# Altium footprint library KM_ALTIUM.PcbLib: 265 footprints (part 7 of 17)
Each footprint in its own frame and in the unit in brackets; x right, y up, seen from the top. Pads: shape width x height; smd on the part's side, far side on the other; paste and mask are expansions set on the pad; w line width, h text height; cw(c..) or ccw(c..) is an arc to the next point about the centre after c.
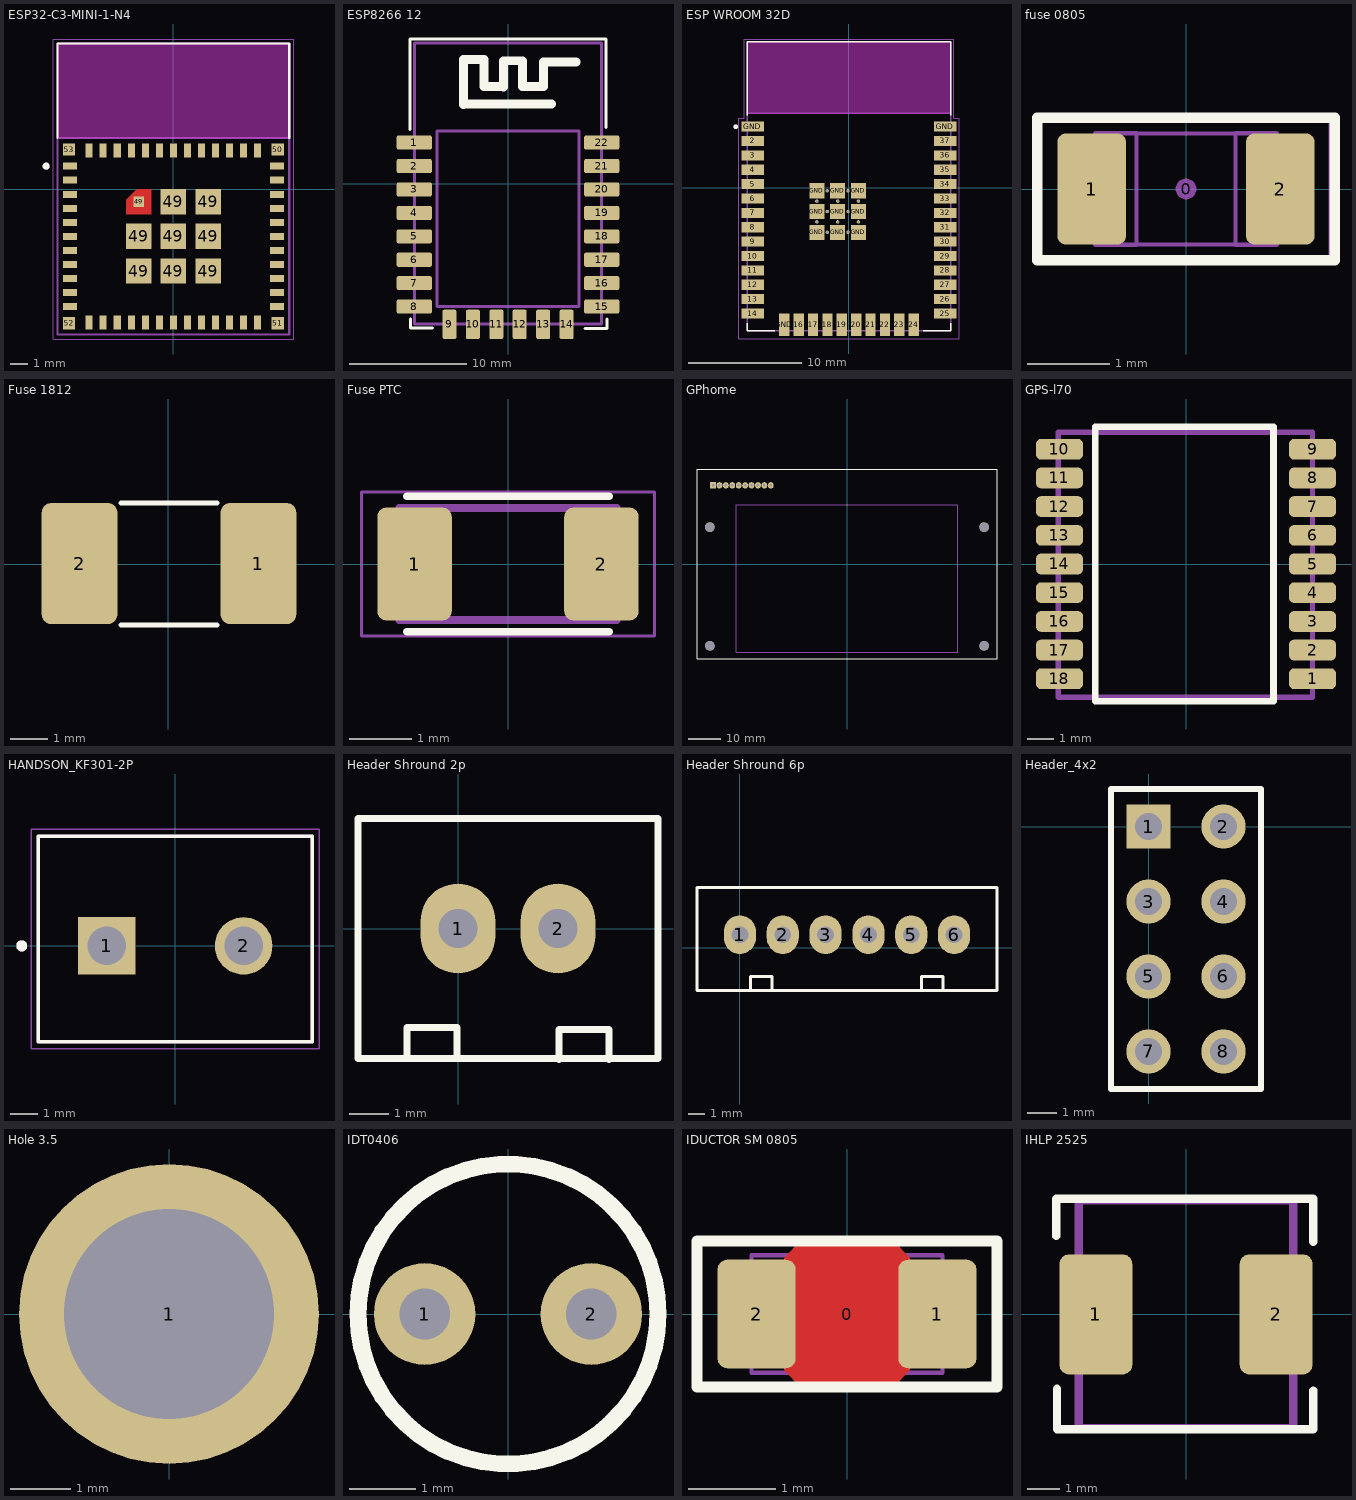
[diagram p6: the footprints below, top view; thin cyan lines are the x and y axes]

## ESP32-C3-MINI-1-N4 [mm]
height 2.55
pads (61):
  rect 0.8x0.4 smd: 1(-5.9,1.3) 2(-5.9,0.5) 3(-5.9,-0.3) 4(-5.9,-1.1) 5(-5.9,-1.9) 6(-5.9,-2.7) 7(-5.9,-3.5) 8(-5.9,-4.3) 9(-5.9,-5.1) 10(-5.9,-5.9) 11(-5.9,-6.7) 25(5.9,-6.7) 26(5.9,-5.9) 27(5.9,-5.1) 28(5.9,-4.3) 29(5.9,-3.5) 30(5.9,-2.7) 31(5.9,-1.9) 32(5.9,-1.1) 33(5.9,-0.3) 34(5.9,0.5) 35(5.9,1.3)
  rect 0.4x0.8 smd: 12(-4.8,-7.6) 13(-4,-7.6) 14(-3.2,-7.6) 15(-2.4,-7.6) 16(-1.6,-7.6) 17(-0.8,-7.6) 18(0,-7.6) 19(0.8,-7.6) 20(1.6,-7.6) 21(2.4,-7.6) 22(3.2,-7.6) 23(4,-7.6) 24(4.8,-7.6) 36(4.8,2.2) 37(4,2.2) 38(3.2,2.2) 39(2.4,2.2) 40(1.6,2.2) 41(0.8,2.2) 42(0,2.2) 43(-0.8,2.2) 44(-1.6,2.2) 45(-2.4,2.2) 46(-3.2,2.2) 47(-4,2.2) 48(-4.8,2.2)
  rect 1.45x1.45 smd: 49(-1.975,-4.675) 49(-1.975,-2.7) 49(0,-4.675) 49(0,-2.7) 49(0,-0.725) 49(1.975,-4.675) 49(1.975,-2.7) 49(1.975,-0.725)
  rect 0.6x0.6 smd paste-1 mask+0: 49(-1.975,-0.725)
  rect 0.7x0.7 smd: 50(5.95,2.25) 51(5.95,-7.65) 52(-5.95,-7.65) 53(-5.95,2.25)
Top Layer:
  region: -1.25,-1.45 -2.7,-1.45 -2.7,-0.6 -2.1,0 -1.25,0
Top Overlay:
  circle w0.2: c-7.25,1.3 r0.1
  lines w0.127: -6.6,2.92 -6.6,8.3 6.6,8.3 6.6,2.92
Top Paste:
  region: -1.25,-1.45 -2.7,-1.45 -2.7,-0.6 -2.1,0 -1.25,0
Top Solder:
  region: -1.15,-1.55 -2.8,-1.55 -2.8,-0.56 -2.14,0.1 -1.15,0.1
Keep-Out Layer:
  region: 6.6,2.9 -6.6,2.9 -6.6,8.3 6.6,8.3
  region: 6.6,2.9 -6.6,2.9 -6.6,8.3 6.6,8.3
Mechanical 13:
  circle w0.2: c-7.25,1.3 r0.1
  lines w0.127: -6.6,2.9 -6.6,-8.3 6.6,-8.3 6.6,2.9 ; -6.6,2.9 -6.6,8.3 6.6,8.3 6.6,2.9 ; -6.6,2.9 6.6,2.9
Mechanical 15:
  lines w0.05: -6.85,-8.55 -6.85,8.55 6.85,8.55 6.85,-8.55 -6.85,-8.55
3D body "ESP32-C3-MINI-1-N4--3DModel-STEP-418109 (1).STEP": height 2.55, standoff 0, extent -6.6,-8.3 6.6,8.3

## ESP8266 12 [mm]
pads (22):
  rrect25% 3x1.2 smd: 1(-8.001,3.5) 2(-8.001,1.5) 3(-8.001,-0.5) 4(-8.001,-2.5) 5(-8.001,-4.5) 6(-8.001,-6.5) 7(-8.001,-8.5) 8(-8.001,-10.5) 15(8,-10.5) 16(8,-8.5) 17(8,-6.5) 18(8,-4.5) 19(8,-2.5) 20(8,-0.5) 21(8,1.5) 22(8,3.5)
  rrect25% 1.2x2.5 smd: 9(-5,-12.014) 10(-3,-12.014) 11(-1,-12.014) 12(1,-12.014) 13(3,-12.014) 14(5,-12.014)
Top Overlay:
  lines w0.254: -8.382,4.623 -8.382,12.344 8.357,12.344 8.357,4.775 ; -8.306,-11.557 -8.306,-12.319 -6.426,-12.319 ; 6.553,-12.37 8.433,-12.37 8.433,-11.557
  lines w0.762: 3.734,6.782 -3.734,6.782 -3.785,6.731 -3.785,10.566 -3.81,10.592 -2.057,10.592 -2.057,8.28 -0.406,8.28 -0.381,8.255 -0.381,10.49 1.245,10.49 1.245,8.28 3.023,8.28 3.023,10.389 5.817,10.389
Mechanical 3:
  lines w0.254: -8,-12 -8,12 8,12 8,-12 -8,-12
Mechanical 13:
  lines w0.254: 6.02,-10.5 -6.071,-10.5 -6.071,4.496 6.045,4.496 6.045,-10.5
3D body "User Library-EPS8266 ESP-12E.STEP": height 2.65, standoff -0.04, extent -8.005,-11.98 8.005,12.025

## ESP WROOM 32D [mm]
pads (59):
  rect 2x0.9 smd: 2(-8.5,4.117) 3(-8.5,2.847) 4(-8.5,1.577) 5(-8.5,0.307) 6(-8.5,-0.963) 7(-8.5,-2.233) 8(-8.5,-3.503) 9(-8.5,-4.773) 10(-8.5,-6.043) 11(-8.5,-7.313) 12(-8.5,-8.583) 13(-8.5,-9.853) 14(-8.5,-11.123) 25(8.5,-11.123) 26(8.5,-9.853) 27(8.5,-8.583) 28(8.5,-7.313) 29(8.5,-6.043) 30(8.5,-4.773) 31(8.5,-3.503) 32(8.5,-2.233) 33(8.5,-0.963) 34(8.5,0.307) 35(8.5,1.577) 36(8.5,2.847) 37(8.5,4.117) GND(-8.5,5.387) GND(8.5,5.387)
  rect 0.9x2 smd: 16(-4.445,-12.123) 17(-3.175,-12.123) 18(-1.905,-12.123) 19(-0.635,-12.123) 20(0.635,-12.123) 21(1.905,-12.123) 22(3.175,-12.123) 23(4.445,-12.123) 24(5.715,-12.123) GND(-5.715,-12.123)
  rect 1.33x1.33 smd: GND(-2.835,-3.948) GND(-2.835,-2.113) GND(-2.835,-0.278) GND(-1,-3.948) GND(-1,-2.113) GND(-1,-0.278) GND(0.835,-3.948) GND(0.835,-2.113) GND(0.835,-0.278)
  round 0.3 hole 0.2: GND(-2.835,-3.03) GND(-2.835,-1.195) GND(-1.917,-3.948) GND(-1.917,-2.113) GND(-1.917,-0.278) GND(-1,-3.03) GND(-1,-1.195) GND(-0.082,-3.948) GND(-0.082,-2.113) GND(-0.082,-0.278) GND(0.835,-3.03) GND(0.835,-1.195)
Top Overlay:
  circle w0.2: c-10,5.377 r0.1
  lines w0.127: -9,-11.973 -9,-12.623 -6.55,-12.623 ; -9,6.377 -9,12.877 9,12.877 9,6.377 ; 6.55,-12.623 9,-12.623 9,-11.973
Keep-Out Layer:
  region: 9,6.577 -9,6.577 -9,12.877 9,12.877
Mechanical 13:
  circle w0.2: c-10,5.377 r0.1
  lines w0.127: -9,6.577 -9,-12.623 9,-12.623 9,6.577 ; -9,6.577 -9,12.877 9,12.877 9,6.577 ; -9,6.577 9,6.577
Mechanical 15:
  lines w0.05: -9.75,-13.373 9.75,-13.373 9.75,6.127 9.25,6.127 9.25,13.127 -9.25,13.127 -9.25,6.127 -9.75,6.127 -9.75,-13.373
3D body "step_temp.STEP": height 3.25, standoff 0, extent -9,-12.623 9,12.877

## fuse 0805 [mm]
pads (3):
  round 0.254 on Mech15: 0(0,0)
  rrect25% 0.83x1.35 smd: 1(-1.143,0) 2(1.143,0)
Top Overlay:
  lines w0.127: -1.803,-0.864 1.803,-0.864 1.803,0.864 -1.803,0.864 -1.803,-0.864
Mechanical 13:
  lines w0.05: 0.6,-0.674 -0.6,-0.674 ; -0.6,-0.674 0.6,-0.674 ; -0.6,-0.675 -1.1,-0.675 -1.1,0.675 -0.6,0.675 -0.6,-0.675 ; 0.6,-0.675 1.1,-0.675 1.1,0.675 0.6,0.675 ; 0.6,-0.675 0.6,0.675 ; 0.6,0.674 -0.6,0.674 0.6,0.674
Mechanical 15:
  lines w0.1: -1.803,-0.85 -1.803,0.85 1.778,0.85 1.778,-0.85 -1.803,-0.85
3D body "User Library-fuse0805L050WR.STEP": height 0.75, standoff -0.75, extent -1.156,-0.61 1.054,0.635

## Fuse 1812 [mm]
pads (2):
  rrect25% 2x3.2 smd: 1(2.388,0.025) 2(-2.337,0.025)
Top Overlay:
  lines w0.127: -1.245,-1.6 1.295,-1.6 ; -1.245,1.626 1.295,1.626
3D body "User Library-fuse1812.STEP": height 1.32, standoff 0, extent -2.385,-1.585 2.435,1.635

## Fuse PTC [mm] "1206 1A 6V PTC SMD"
pads (2):
  rrect25% 1.2x1.82 smd: 1(-1.505,0) 2(1.505,0)
Top Overlay:
  lines w0.127: -1.63,-1.09 1.63,-1.09 ; -1.63,1.09 1.63,1.09
Mechanical 13:
  lines w0.127: -1.75,-0.9 -1.75,0.9 1.75,0.9 1.75,-0.9 -1.75,-0.9
Mechanical 15:
  lines w0.05: -2.36,-1.16 -2.36,1.16 2.36,1.16 2.36,-1.16 -2.36,-1.16
3D body "step_temp.STEP": height 0.43, standoff -0.43, extent -1.625,-0.825 1.625,0.825

## GPhome [mm]
pads (14):
  rect 1.8x2 hole 0.762: 1(-41.75,24.5)
  oval 1.8x2 hole 0.762: 2(-39.75,24.5) 3(-37.75,24.5) 4(-35.75,24.5) 5(-33.75,24.5) 6(-31.75,24.5) 7(-29.75,24.5) 8(-27.75,24.5) 9(-25.75,24.5) 10(-23.75,24.5)
  round 3 hole 3 unplated: ""(-42.75,-25.5) ""(-42.75,11.5) ""(42.75,-25.5) ""(42.75,11.5)
Top Overlay:
  lines w0.254: -46.75,-29.5 46.75,-29.5 46.75,29.5 -46.75,29.5 -46.75,-29.464
Mechanical 1:
  lines w0.254: -34.5,-27.5 -34.5,18.5 34.5,18.5 34.5,-27.5 -34.5,-27.5
3D body "User Library-GLCD-GPhone1.STEP": height 9.11, standoff -0.01, extent -46.774,-29.602 46.825,29.398

## GPS-l70 [mm]
pads (18):
  rrect50% 1.8x0.8 smd: 1(4.85,-4.4) 2(4.85,-3.3) 3(4.85,-2.2) 4(4.85,-1.1) 5(4.85,0) 6(4.85,1.1) 7(4.85,2.2) 8(4.85,3.3) 9(4.85,4.4) 10(-4.85,4.4) 11(-4.85,3.3) 12(-4.85,2.2) 13(-4.85,1.1) 14(-4.85,0) 15(-4.85,-1.1) 16(-4.85,-2.2) 17(-4.85,-3.3) 18(-4.85,-4.4)
Top Overlay:
  lines w0.254: -3.48,-5.258 3.353,-5.258 3.353,5.258 -3.48,5.258 -3.48,-5.258
Mechanical 3:
  lines w0.203: -4.902,-5.105 -4.902,5.055 4.85,5.055 4.85,-5.105 -4.902,-5.105
3D body "User Library-QUECTEL L70.STEP": height 2.52, standoff 0, extent -4.85,-5.075 4.85,5.025

## HANDSON_KF301-2P [mm]
pads (2):
  rect 2.1x2.1 hole 1.4: 1(-2.5,0)
  round 2.1 hole 1.4: 2(2.5,0)
Top Overlay:
  circle w0.2: c-5.6,0 r0.1
  lines w0.127: -5,-3.5 5,-3.5 5,4 -5,4 -5,-3.5
Mechanical 13:
  circle w0.2: c-5.6,0 r0.1
  lines w0.127: -5,-3.5 -5,4 5,4 5,-3.5 -5,-3.5
Mechanical 15:
  lines w0.05: -5.25,-3.75 -5.25,4.25 5.25,4.25 5.25,-3.75 -5.25,-3.75
3D body "KF301-2P--3DModel-STEP-510211.STEP": height 10, standoff -4.5, extent -5.6,-3.35 5,4.15

## Header Shround 2p [mm]
pads (2):
  oval 1.905x2.286 hole 1: 1(0,0) 2(2.54,0)
Top Overlay:
  lines w0.178: -1.295,-3.277 -1.295,-2.515 -0.025,-2.515 -0.025,-3.277 ; 2.565,-3.327 2.565,-2.565 3.835,-2.565 3.835,-3.327 ; -2.54,-3.302 5.08,-3.302 5.08,2.794 -2.54,2.794 -2.54,-3.302
3D body "User Library-Header 2P 2_54.step": height 7.21, standoff -3.49, extent -2.445,-3.179 5.055,2.621

## Header Shround 6p [mil]
pads (6):
  oval 75x90 hole 39.37: 1(0,30) 2(100,30) 3(200,30) 4(300,30) 5(400,30) 6(500,30)
Top Overlay:
  lines w7: 25,-97 25,-67 75,-67 75,-97 ; 424,-98 424,-68 474,-68 474,-98 ; -100,-100 600,-100 600,0 600,140 -100,140 -100,-100
3D body "User Library-Header 6P 2_54 (1).step": height 141.73, standoff -259.84, extent -94.49,-94.34 594.49,134

## Header_4x2 [mm]
pads (8):
  rect 1.5x1.5 hole 0.9: 1(0,0)
  round 1.5 hole 0.9: 2(2.54,0) 3(0,-2.54) 4(2.54,-2.54) 5(0,-5.08) 6(2.54,-5.08) 7(0,-7.62) 8(2.54,-7.62)
Top Overlay:
  lines w0.2: -1.27,-8.89 -1.27,1.27 3.81,1.27 3.81,-8.89 -1.27,-8.89

## Hole 3.5 [mm]
pads (1):
  round 5 hole 3.5: 1(0,0)

## IDT0406 [mil] "0406+0507"
pads (2):
  round 60 hole 30: 1(-49.21,0) 2(49.21,0)
Top Overlay:
  circle w10: c0,0 r88.58
3D body "1100R_MUR.step": height 295, standoff -187.05, extent -98.5,-98.5 98.51,98.5

## IDUCTOR SM 0805 [mm]
pads (3):
  round 0.254 on Mech15: 0(0,0)
  rrect25% 0.9x1.25 smd: 1(1.041,0) 2(-1.041,0)
Top Layer:
  pour cut-out: 0.725,-0.65 0.525,-0.85 -0.525,-0.85 -0.725,-0.65 -0.725,0.65 -0.525,0.85 0.525,0.85 0.725,0.65
Top Overlay:
  lines w0.127: -1.727,-0.838 1.727,-0.838 1.727,0.838 -1.727,0.838 -1.727,-0.838
Mechanical 13:
  lines w0.05: -0.6,0.674 0.6,0.674 ; -0.6,-0.674 0.6,-0.674 -0.6,-0.674 ; -0.6,-0.675 -0.6,0.675 ; -0.6,-0.675 -1.1,-0.675 -1.1,0.675 -0.6,0.675 ; -0.6,0.674 0.6,0.674 ; 0.6,0.675 1.1,0.675 1.1,-0.675 0.6,-0.675 0.6,0.675
Mechanical 15:
  lines w0.1: -1.727,-0.85 -1.727,0.85 1.727,0.85 1.727,-0.85 -1.727,-0.85
3D body "User Library-Chip InductorINDC2012X95N.STEP": height 0.96, standoff 0.01, extent -1,-0.6 1,0.6

## IHLP 2525 [mil]
pads (2):
  rrect25% 88x145 smd: 1(-109,0) 2(109,0)
Top Overlay:
  lines w10: -157,95 -157,140 154,140 154,88 ; -156,-90 -156,-139 154,-139 154,-92
Mechanical 3:
  lines w10: -129.92,-137.8 129.92,-137.8 129.92,137.8 -129.92,137.8 -129.92,-137.72
3D body "User Library-IHLP.STEP": height 127.27, standoff 0.16, extent -151.26,-133.41 147.95,134.3